# Altium footprint library Single_ETU_b_rev1.PcbLib: 25 footprints (part 4 of 4)
Each footprint in its own frame and in the unit in brackets; x right, y up, seen from the top. Pads: shape width x height; smd on the part's side, far side on the other; paste and mask are expansions set on the pad; w line width, h text height; cw(c..) or ccw(c..) is an arc to the next point about the centre after c.
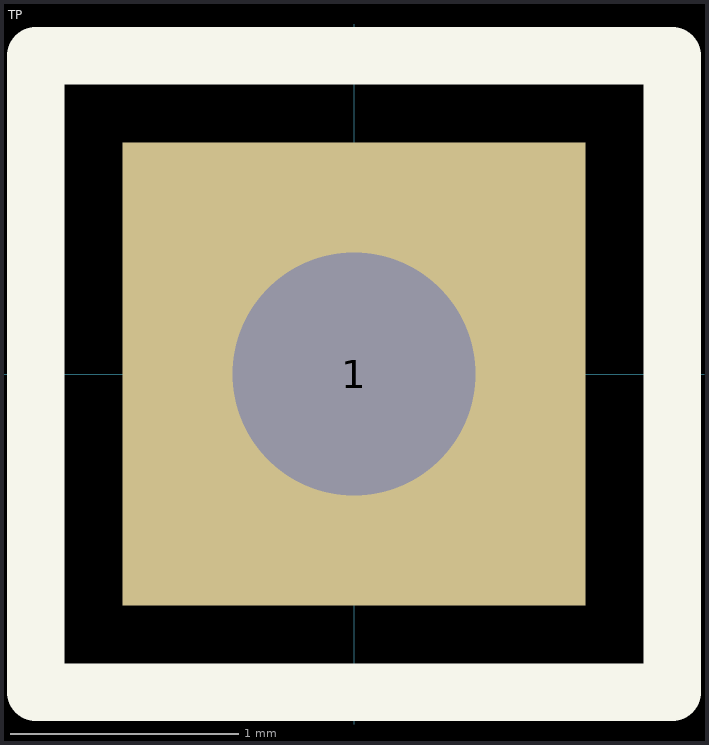
[diagram p3: the footprint, top view; thin cyan lines are the x and y axes]

## TP [mil]
height 109.84
pads (1):
  rect 80x80 / inner round 80 / far side rect 80x80 hole 42: 1(0,0)
Top Overlay:
  lines w10: -55,-55 -55,55 55,55 55,-55 -55,-55